# Altium footprint library SYNCBOX.PcbLib: 77 footprints (part 4 of 5)
Each footprint in its own frame and in the unit in brackets; x right, y up, seen from the top. Pads: shape width x height; smd on the part's side, far side on the other; paste and mask are expansions set on the pad; w line width, h text height; cw(c..) or ccw(c..) is an arc to the next point about the centre after c.
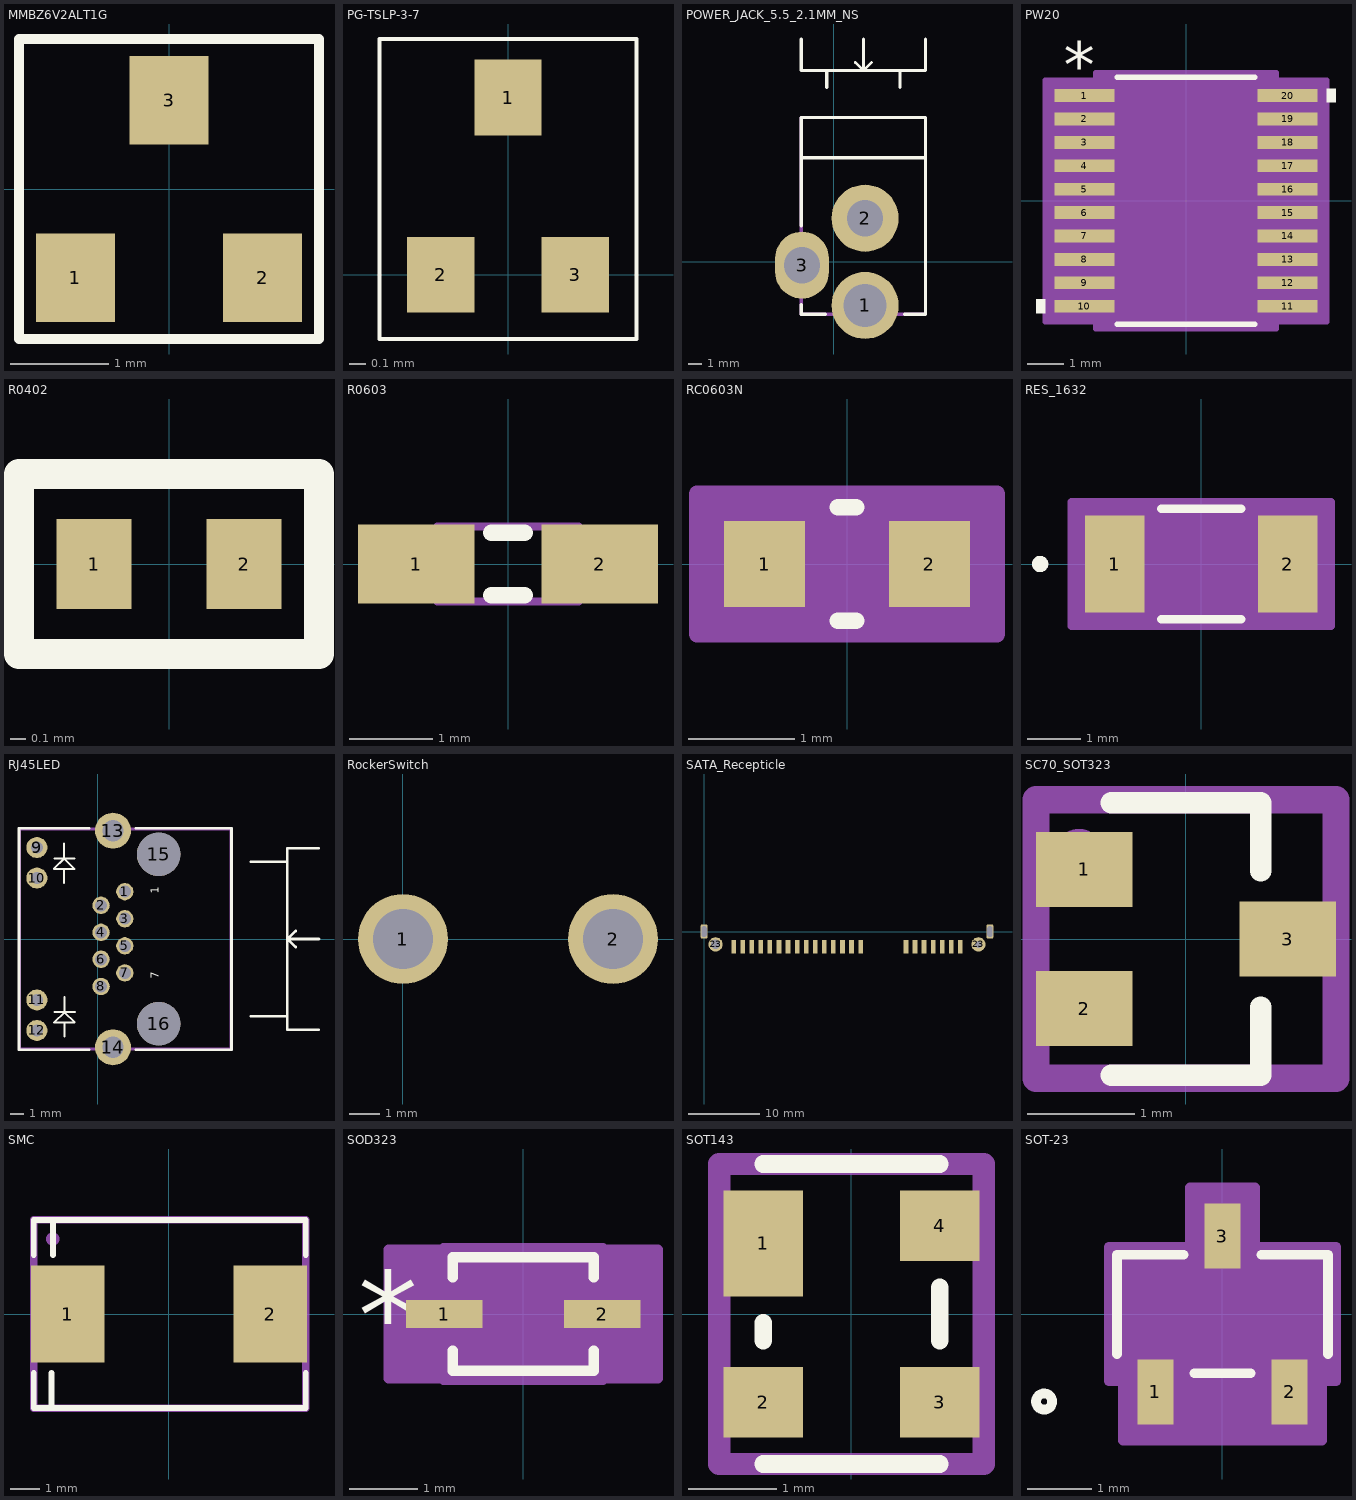
[diagram p3: the footprints below, top view; thin cyan lines are the x and y axes]

## MMBZ6V2ALT1G [mm]
pads (3):
  rect 0.8x0.9 smd: 1(-0.95,-0.9) 2(0.95,-0.9) 3(0,0.9)
Top Overlay:
  lines w0.1: -1.524,-1.524 -1.524,1.524 1.524,1.524 1.524,-1.524 -1.524,-1.524
3D body: height 0.3, standoff 0.01, extent 0.635,-1.27 1.27,-0.889
3D body: height 0.3, standoff 0.01, extent -1.27,-1.27 -0.635,-0.889
3D body: height 0.3, standoff 0.01, extent -0.381,0.889 0.381,1.27
3D body: height 0.89, standoff 0.01, extent -1.524,-0.889 1.524,0.889

## PG-TSLP-3-7 [mm]
pads (3):
  rect 0.4x0.45 smd: 1(0,1.05) 2(-0.4,0) 3(0.4,0)
Top Overlay:
  lines w0.025: -0.762,0.508 -0.762,0.381 ; -0.762,0.381 -0.762,-0.381 0.762,-0.381 0.762,1.397 -0.762,1.397 -0.762,0.381
3D body: height 0.2, standoff 0, extent 0.254,-0.127 0.508,0.127
3D body: height 0.2, standoff 0, extent -0.508,-0.127 -0.254,0.127
3D body: height 0.2, standoff 0, extent -0.127,1.016 0.127,1.27
3D body: height 0.55, standoff 0.15, extent -0.635,0.127 0.635,1.016

## POWER_JACK_5.5_2.1MM_NS [mm]
pads (3):
  round 5 hole 3.2: 1(2.35,-3.25)
  round 5 hole 2.7: 2(2.35,3.25)
  oval 4x5 hole 2.7: 3(-2.35,-0.25)
Top Overlay:
  lines w0.2: 1.625,14.85 2.225,14.25 ; 2.225,16.6 2.225,14.25 ; 2.825,14.85 2.225,14.25
  lines w0.254: -2.4,-3.2 -2.4,-3.9 -0.6,-3.9 ; -2.4,2.7 -2.4,10.75 6.85,10.75 6.85,-3.9 5.3,-3.9 ; -2.4,7.75 6.85,7.75 ; -2.4,16.6 -2.4,14.25 6.85,14.25 6.85,16.6 ; -0.5,13 -0.5,14.25 ; 4.95,13 4.95,14.25
Mechanical 16:
  lines w0.254: -2.4,-3.9 6.85,-3.9 6.85,10.75 -2.4,10.75 -2.4,-3.9
Mechanical 29:
  text ".Designator" at -0.27,1.34 h1.52
3D body "CUI-PJ-002AH.step": height 11, standoff -3.5, extent -2.55,-3.9 6.85,10.5

## PW20 [mil]
pads (20):
  rect 66x14 smd paste+0 mask+0: 1(-111,115.16) 2(-111,89.57) 3(-111,63.98) 4(-111,38.39) 5(-111,12.8) 6(-111,-12.8) 7(-111,-38.39) 8(-111,-63.98) 9(-111,-89.57) 10(-111,-115.16) 11(111,-115.16) 12(111,-89.57) 13(111,-63.98) 14(111,-38.39) 15(111,-12.8) 16(111,12.8) 17(111,38.39) 18(111,63.98) 19(111,89.57) 20(111,115.16)
Top Overlay:
  region: -154,-107.66 -164,-107.66 -164,-122.66 -154,-122.66
  region: 154,122.66 164,122.66 164,107.66 154,107.66
  lines w6: -75.42,-135 75.42,-135 ; -75.42,135 75.42,135
  text "*" at -133.5,124.16 h50
Mechanical 13:
  lines w0: -12,130 ccw(c0,130) 12,130
  lines w1: -130,-121.16 -130,-109.16 -88.5,-109.16 -88.5,-121.16 -130,-121.16 ; -130,-95.57 -130,-83.57 -88.5,-83.57 -88.5,-95.57 -130,-95.57 ; -130,-69.98 -130,-57.98 -88.5,-57.98 -88.5,-69.98 -130,-69.98 ; -130,-44.39 -130,-32.39 -88.5,-32.39 -88.5,-44.39 -130,-44.39 ; -130,-18.8 -130,-6.8 -88.5,-6.8 -88.5,-18.8 -130,-18.8 ; -130,6.8 -130,18.8 -88.5,18.8 -88.5,6.8 -130,6.8 ; -130,32.39 -130,44.39 -88.5,44.39 -88.5,32.39 -130,32.39 ; -130,57.98 -130,69.98 -88.5,69.98 -88.5,57.98 -130,57.98 ; -130,83.57 -130,95.57 -88.5,95.57 -88.5,83.57 -130,83.57 ; -130,109.16 -130,121.16 -88.5,121.16 -88.5,109.16 -130,109.16 ; -88.5,-130 88.5,-130 88.5,130 -88.5,130 -88.5,-130 ; 88.5,-121.16 88.5,-109.16 130,-109.16 130,-121.16 88.5,-121.16 ; 88.5,-95.57 88.5,-83.57 130,-83.57 130,-95.57 88.5,-95.57 ; 88.5,-69.98 88.5,-57.98 130,-57.98 130,-69.98 88.5,-69.98 ; 88.5,-44.39 88.5,-32.39 130,-32.39 130,-44.39 88.5,-44.39 ; 88.5,-18.8 88.5,-6.8 130,-6.8 130,-18.8 88.5,-18.8 ; 88.5,6.8 88.5,18.8 130,18.8 130,6.8 88.5,6.8 ; 88.5,32.39 88.5,44.39 130,44.39 130,32.39 88.5,32.39 ; 88.5,57.98 88.5,69.98 130,69.98 130,57.98 88.5,57.98 ; 88.5,83.57 88.5,95.57 130,95.57 130,83.57 88.5,83.57 ; 88.5,109.16 88.5,121.16 130,121.16 130,109.16 88.5,109.16
  text "*" at -86,77 h50
Mechanical 15:
  region: -98.5,-132.16 -154,-132.16 -154,132.16 -98.5,132.16 -98.5,140 98.5,140 98.5,132.16 154,132.16 154,-132.16 98.5,-132.16 98.5,-140 -98.5,-140
  lines w6: -154,-132.16 -154,132.16 -98.5,132.16 -98.5,140 98.5,140 98.5,132.16 154,132.16 154,-132.16 98.5,-132.16 98.5,-140 -98.5,-140 -98.5,-132.16 -154,-132.16
3D body "PW20.step": height 47.09, standoff 0, extent -130,-130 130,130
3D body: height 10, standoff 0, extent 0,0 10,10

## R0402 [mm]
pads (2):
  rect 0.5x0.6 smd: 1(-0.5,0) 2(0.5,0)
Top Overlay:
  lines w0.2: -1,-0.6 1,-0.6 1,0.6 -1,0.6 -1,-0.6
Mechanical 16:
  lines w0.15: -1,-0.6 -1,0.6 1,0.6 1,-0.6 -1,-0.6
Mechanical 29:
  text ".Designator" at 2,0.2 h0.4
3D body "R0402.step": height 0.4, standoff 0, extent -0.5,-0.25 0.5,0.25

## R0603 [mm]
pads (2):
  rect 1.4x0.95 smd: 1(-1.1,0) 2(1.1,0)
Top Overlay:
  lines w0.2: -0.2,-0.375 0.2,-0.375 ; -0.2,0.375 0.2,0.375
Mechanical 13:
  lines w0.1: -0.85,-0.45 -0.85,0.45 0.85,0.45 0.85,-0.45 -0.85,-0.45
3D body: height 0.55, standoff 0, extent -0.85,-0.45 0.85,0.45

## RC0603N [mil]
pads (2):
  rect 30x32 smd paste+0 mask+0: 1(-30.5,0) 2(30.5,0)
Top Overlay:
  lines w6: -3.39,-21 3.39,-21 ; -3.39,21 3.39,21
Mechanical 13:
  lines w1: -31.5,-16 -31.5,16 ; -31.5,-16 31.5,-16 ; -31.5,-16 -15.5,-16 -15.5,16 -31.5,16 ; -31.5,-16 -31.5,16 ; -31.5,16 31.5,16 ; 31.5,-16 31.5,16 ; 31.5,-16 31.5,16 ; 31.5,-16 15.5,-16 15.5,16 31.5,16
Mechanical 15:
  region: 55.5,-26 -55.5,-26 -55.5,26 55.5,26
  lines w6: -55.5,-26 55.5,-26 55.5,26 -55.5,26 -55.5,-26
3D body "RC0603N.stp": height 27.99, standoff 0, extent -31.49,-15.98 31.5,15.99
3D body: height 10, standoff 0, extent 0,0 10,10

## RES_1632 [mm]
pads (2):
  rect 1.106x1.8 smd paste+0 mask+0: 1(-1.603,0) 2(1.603,0)
Top Overlay:
  circle w0.152: c-2.994,0 r0.076
  lines w0.152: -0.742,-1.027 0.742,-1.027 ; -0.742,1.027 0.742,1.027
Mechanical 13:
  circle w0: c-1.476,0 r0.076
  lines w0.025: -1.8,-0.9 -1.8,0.9 ; -1.8,-0.9 1.8,-0.9 ; -1.8,-0.9 -1.05,-0.9 -1.05,0.9 -1.8,0.9 ; -1.8,-0.9 -1.8,0.9 ; -1.8,0.9 1.8,0.9 ; 1.8,-0.9 1.8,0.9 ; 1.8,-0.9 1.8,0.9 ; 1.8,-0.9 1.05,-0.9 1.05,0.9 1.8,0.9
Mechanical 15:
  region: 2.41,-1.154 -2.41,-1.154 -2.41,1.154 2.41,1.154
  lines w0.152: -2.41,-1.154 2.41,-1.154 2.41,1.154 -2.41,1.154 -2.41,-1.154
3D body "RES_1632.stp": height 0.5, standoff 0, extent -1.8,-0.9 1.8,0.9
3D body: height 0.25, standoff 0, extent 0,0 0.254,0.254

## RJ45LED [mm]
pads (16):
  round 1.3 hole 0.9: 1(2.03,3.55) 2(0.25,2.53) 3(2.03,1.52) 4(0.25,0.5) 5(2.03,-0.51) 6(0.25,-1.52) 7(2.03,-2.54) 8(0.25,-3.56)
  round 1.575 hole 0.9: 9(-4.57,6.86) 10(-4.57,4.57) 11(-4.57,-4.57) 12(-4.57,-6.86)
  round 2.7 hole 1.6: 13(1.14,8.13) 14(1.14,-8.13)
  round 3.25 hole 3.25 unplated: 15(4.57,6.35) 16(4.57,-6.35)
Top Overlay:
  lines w0.15: -3.26,6.04 -1.74,6.04 ; -3.24,-5.48 -1.72,-5.48 ; -2.53,4.22 -2.53,5.26 ; -2.53,7.15 -2.53,6.03 -1.76,5.26 -3.29,5.26 -2.51,6.04 ; -2.51,-7.3 -2.51,-6.26 ; -2.51,-4.37 -2.51,-5.49 -1.74,-6.26 -3.27,-6.26 -2.49,-5.48
  lines w0.2: -0.66,-8.3 -5.91,-8.3 -5.91,8.3 -0.66,8.3 ; 2.86,-8.3 10.03,-8.3 10.03,8.3 2.86,8.3 ; 11.5,-5.8 14.23,-5.8 ; 11.5,5.8 14.23,5.8 ; 14.85,-0.6 14.25,0 ; 14.85,0.6 14.25,0 ; 16.58,-6.8 14.23,-6.8 14.23,6.8 16.58,6.8 ; 16.6,0 14.25,0
  text "1" at 4.58,3.4 h0.6
  text "7" at 4.58,-3 h0.6
Mechanical 16:
  lines w0.254: -5.87,-8.25 -5.87,8.25 10.03,8.25 10.03,-8.15 9.93,-8.25 -5.87,-8.25
Mechanical 29:
  text ".Designator" at 0.5,2 h1.52
3D body "c-2-406549-1-r4-3d.stp": height 14.8, standoff -3.92, extent -5.9,-9.3 10.821,9.328

## RockerSwitch [mm]
pads (2):
  round 3 hole 2: 1(0,0) 2(7,0)
3D body "R1966AxxxxxxGR.stp": height 13.75, standoff -5.65, extent -10.447,-0.682 10.497,22.205

## SATA_Recepticle [mm]
pads (26):
  rect 0.65x1.9 smd: 1(35.87,-2.14) 2(34.6,-2.14) 3(33.33,-2.14) 4(32.06,-2.14) 5(30.79,-2.14) 6(29.52,-2.14) 7(28.25,-2.14) 8(21.905,-2.14) 9(20.635,-2.14) 10(19.365,-2.14) 11(18.095,-2.14) 12(16.825,-2.14) 13(15.555,-2.14) 14(14.285,-2.14) 15(13.015,-2.14) 16(11.745,-2.14) 17(10.475,-2.14) 18(9.205,-2.14) 19(7.935,-2.14) 20(6.665,-2.14) 21(5.395,-2.14) 22(4.125,-2.14)
  rrect50% 1x2 hole 0.7 slot 1.5 at 90 deg: 23(0,0) 23(40,0)
  round 2 hole 1.3: 23(1.6,-1.8)
  round 2 hole 1: 23(38.4,-1.8)
3D body "s10029364001LF.stp": height 5.6, standoff -2.22, extent -1.168,-2.974 41.232,9.426

## SC70_SOT323 [mm]
pads (3):
  rect 0.9x0.7 smd: 1(-0.95,0.65) 2(-0.95,-0.65) 3(0.95,0)
Top Overlay:
  lines w0.2: -0.699,-1.27 0.699,-1.27 0.699,-0.635 ; -0.699,1.27 0.699,1.27 0.699,0.635
Mechanical 16:
  circle w0.254: c-1,0.8 r0.1
  lines w0.254: -1.4,-1.3 1.4,-1.3 1.4,1.3 -1.4,1.3 -1.4,-1.3
Mechanical 29:
  text ".Designator" at 0.3,-0.4 h0.6
3D body: height 1.1, standoff 0, extent -0.699,-1.27 0.699,1.27
3D body: height 0.75, standoff 0, extent -1.27,0.318 -0.699,1.016
3D body: height 0.75, standoff 0, extent -1.27,-1.016 -0.699,-0.318
3D body: height 0.75, standoff 0, extent 0.699,-0.318 1.27,0.381

## SMC [mm]
pads (2):
  rect 2.5x3.3 smd: 1(-3.45,0) 2(3.45,0)
Top Overlay:
  lines w0.2: -4.6,-2 -4.6,-3.2 4.65,-3.2 4.65,-2 ; -4.6,2 -4.6,3.2 4.65,3.2 4.65,2 ; -4,-3.2 -4,-2 ; -3.95,2 -3.95,3.2
Mechanical 16:
  circle w0.254: c-3.95,2.55 r0.1
  lines w0.254: -4.6,-3.2 -4.6,3.2 4.65,3.2 4.65,-3.2 -4.6,-3.2
Mechanical 29:
  text ".Designator" at 2.1,0.8 h1.52
3D body "DO-214AB SMC.step": height 2.3, standoff 0, extent -3.975,-2.95 3.975,2.95

## SOD323 [mm]
pads (2):
  rect 1.111x0.401 smd paste+0 mask+0: 1(-1.15,0) 2(1.15,0)
Top Overlay:
  lines w0.152: -1.027,-0.533 -1.027,-0.827 1.027,-0.827 1.027,-0.533 ; -1.027,0.533 -1.027,0.827 1.027,0.827 1.027,0.533
  text "*" at -2.404,-0.635 h1.27
Mechanical 13:
  lines w0.025: -0.9,-0.35 -0.55,-0.7 ; -0.9,0.35 -0.55,0.7 ; -1.35,-0.175 -1.35,0.175 -0.9,0.175 -0.9,-0.175 -1.35,-0.175 ; -0.9,-0.7 0.9,-0.7 0.9,0.7 -0.9,0.7 -0.9,-0.7 ; 0.9,-0.175 0.9,0.175 1.35,0.175 1.35,-0.175 0.9,-0.175
  text "*" at -0.964,-0.635 h1.27
Mechanical 15:
  region: -1.154,-0.937 -1.96,-0.937 -1.96,0.937 -1.154,0.937 -1.154,0.954 1.154,0.954 1.154,0.937 1.96,0.937 1.96,-0.937 1.154,-0.937 1.154,-0.954 -1.154,-0.954
  lines w0.152: -1.96,-0.937 -1.96,0.937 -1.154,0.937 -1.154,0.954 1.154,0.954 1.154,0.937 1.96,0.937 1.96,-0.937 1.154,-0.937 1.154,-0.954 -1.154,-0.954 -1.154,-0.937 -1.96,-0.937
3D body: height 0.25, standoff 0, extent 0,0 0.254,0.254
3D body "SOD323.stp": height 0.81, standoff 0, extent -1.35,-0.7 1.35,0.7

## SOT143 [mm]
pads (4):
  rect 0.9x1.2 smd: 1(-1,0.8)
  rect 0.9x0.8 smd: 2(-1,-1) 3(1,-1) 4(1,1)
Top Overlay:
  lines w0.2: -1,-1.7 1,-1.7 ; -1,-0.3 -1,-0.1 ; -1,1.7 1,1.7 ; 1,-0.3 1,0.3
Mechanical 16:
  circle w0.254: c-1,1.1 r0.1
  lines w0.254: -1.5,-1.7 -1.5,1.7 1.5,1.7 1.5,-1.7 -1.5,-1.7
Mechanical 29:
  text ".Designator" at 0.35,-0.5 h0.6
3D body: height 1, standoff 0, extent -1,-1.7 1,1.7

## SOT-23 [mil]
pads (3):
  rect 22x40 smd paste+0 mask+0: 1(-41.34,-48) 2(41.34,-48) 3(0,48)
Top Overlay:
  circle w6: c-110,-54 r5
  lines w6: -65,-24.64 -65,36.5 -24.1,36.5 ; -17.24,-36.5 17.24,-36.5 ; 24.1,36.5 65,36.5 65,-24.64
Mechanical 13:
  circle w0: c-50,-21.5 r5
  lines w1: -60,-31.5 60,-31.5 60,31.5 -60,31.5 -60,-31.5 ; -51.34,-54 -51.34,-31.5 -31.34,-31.5 -31.34,-54 -51.34,-54 ; -10,31.5 10,31.5 10,54 -10,54 -10,31.5 ; 31.34,-54 31.34,-31.5 51.34,-31.5 51.34,-54 31.34,-54
Mechanical 15:
  region: -70,-41.5 -70,41.5 -20,41.5 -20,78 20,78 20,41.5 70,41.5 70,-41.5 61.34,-41.5 61.34,-78 -61.34,-78 -61.34,-41.5
  region: 60,-31.5 -60,-31.5 -60,31.5 60,31.5
  lines w6: -70,-41.5 -70,41.5 -20,41.5 -20,78 20,78 20,41.5 70,41.5 70,-41.5 61.34,-41.5 61.34,-78 -61.34,-78 -61.34,-41.5 -70,-41.5
3D body "SOT-23_J.stp": height 39.53, standoff -0.83, extent -58.07,-48.91 58.07,48.91
3D body: height 10, standoff 0, extent 0,0 10,10